# Altium integrated library TPS62133AQRGTRQ1.IntLib: 1 symbol
Pins are listed as number, name and electrical type; pins without a type are passive.

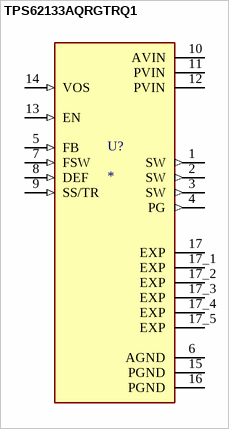
[diagram p0: symbol TPS62133AQRGTRQ1]

## TPS62133AQRGTRQ1
designator U?
3V - 17V 3A AUTOMOTIVE Step-Down Converter In 3X3 QFN Package; MF: Texas Instruments; MP: TPS62133AQRGTRQ1; SnapEDA_Link: https://www.snapeda.com/parts/TPS62133AQRGTRQ1/Texas+Instruments/view-part/?ref=snap; Package: VQFN-16 Texas Instruments; Value: *; Check_prices: https://www.snapeda.com/parts/TPS62133AQRGTRQ1/Texas+Instruments/view-part/?ref=eda
footprint QFN50P300X300X100-17N
pins: 1 SW (out), 2 SW (out), 3 SW (out), 4 PG (out), 5 FB (in), 6 AGND (power), 7 FSW (in), 8 DEF (in), 9 SS/TR (in), 10 AVIN (power), 11 PVIN (power), 12 PVIN (power), 13 EN (in), 14 VOS (in), 15 PGND (power), 16 PGND (power), 17 EXP, 17_1 EXP, 17_2 EXP, 17_3 EXP, 17_4 EXP, 17_5 EXP